# Altium footprint library CustomCase.PcbLib: 411 footprints (part 21 of 26)
Each footprint in its own frame and in the unit in brackets; x right, y up, seen from the top. Pads: shape width x height; smd on the part's side, far side on the other; paste and mask are expansions set on the pad; w line width, h text height; cw(c..) or ccw(c..) is an arc to the next point about the centre after c.
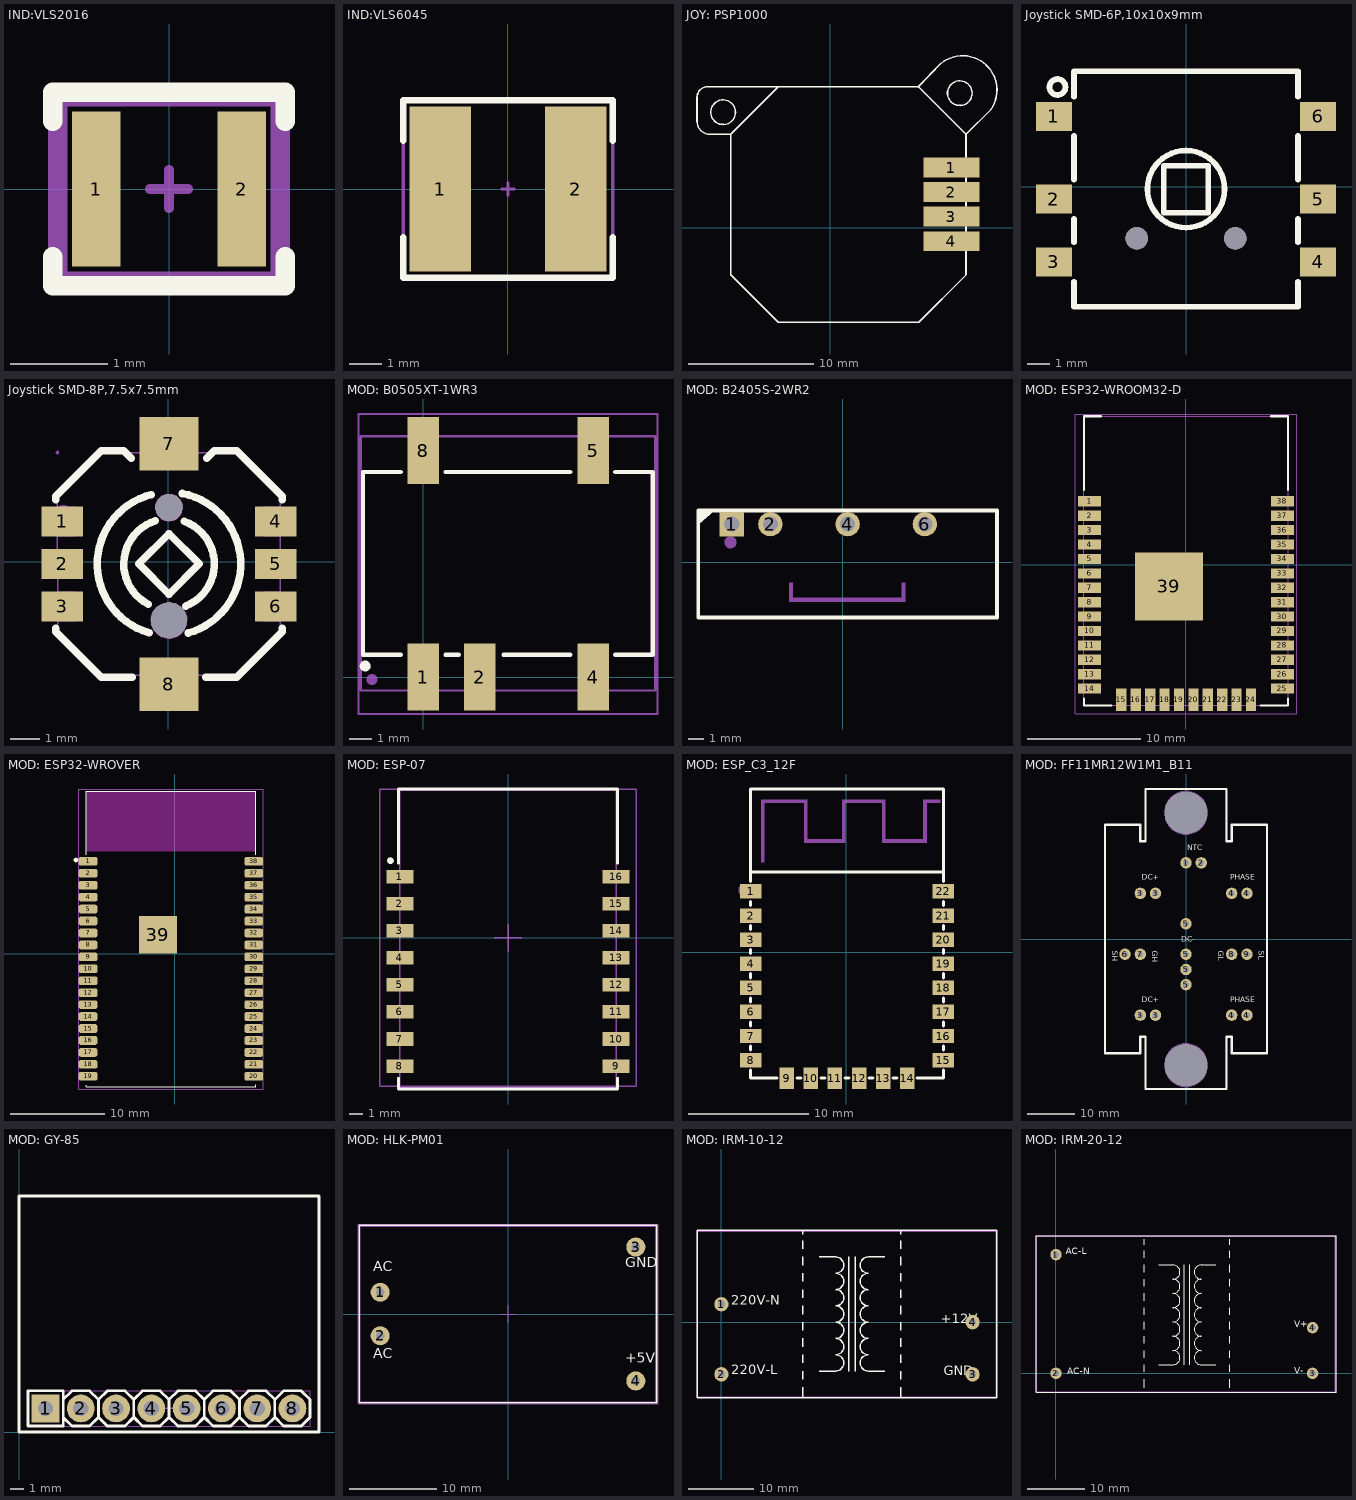
[diagram p20: the footprints below, top view; thin cyan lines are the x and y axes]

## IND:VLS2016 [mm]
pads (2):
  rect 0.5x1.6 smd: 1(-0.75,0) 2(0.75,0)
Top Overlay:
  lines w0.2: -1.2,-0.7 -1.2,-1 1.2,-1 1.2,-0.7 ; -1.2,0.7 -1.2,1 1.2,1 1.2,0.7
Top Assy:
  lines w0.1: -1.1,-0.9 -1.1,0.9 1.1,0.9 1.1,-0.9 -1.1,-0.9
Size Area:
  lines w0.1: -0.2,0 0.2,0 ; 0,-0.2 0,0.2 ; -1.2,-1 -1.2,1 1.2,1 1.2,-1 -1.2,-1
3D body "vls201610hbx-1.step": height 0.99, standoff -0.01, extent -1,-0.8 1,0.8

## IND:VLS6045 [mm]
pads (2):
  rect 1.9x5.1 smd: 1(-2.1,0) 2(2.1,0)
Top Overlay:
  lines w0.2: -3.25,-1.5 -3.25,-2.75 3.25,-2.75 3.25,-1.5 ; -3.25,1.494 -3.25,2.75 3.25,2.75 3.25,1.5
Top Assy:
  lines w0.1: -3.25,2.75 -3.25,-2.75 3.25,-2.75 3.25,2.75 -3.241,2.75
Size Area:
  lines w0.1: -0.2,0 0.2,0 ; 0,-0.2 0,0.2 ; -3.25,-2.75 -3.25,2.75 3.25,2.75 3.25,-2.75 -3.25,-2.75
3D body "vls6045ex.step": height 4.49, standoff -0.01, extent -3,-3 3,3

## JOY: PSP1000 [mm]
pads (4):
  rect 4.5x1.6 smd: 1(9.725,4.825) 2(9.725,2.875) 3(9.725,0.9) 4(9.725,-1.075)
Top Overlay:
  circle w0.127: c10.4,10.8 r0.99
  circle w0.127: c-8.575,9.275 r0.99
  lines w0.127: -4.15,11.325 -7.975,7.5 ; -7.975,7.5 -7.975,7.5 ; -7.975,7.5 -7.975,-3.75 -4.15,-7.575 7.1,-7.575 10.9,-3.775 10.9,7.5 ; -7.975,7.5 -9.625,7.5 cw(c-9.625,8.55) -10.675,8.55 -10.675,10.475 cw(c-9.825,10.475) -9.825,11.325 -9.625,11.325 -4.075,11.325 7.075,11.325 ; 7.075,11.325 8.882,13.178 cw(c10.634,11.058) 12.9,9.5 10.9,7.5 ; 7.075,11.325 7.24,11.16 10.9,7.5
3D body "PSP1000 Joystick v7.sldprt": height 9.74, standoff 0.1, extent -10.625,-7.597 13.289,13.697

## Joystick SMD-6P,10x10x9mm [mm]
pads (8):
  rect 1.6x1.3 smd paste+0 mask+0.05: 1(-5.903,3.15) 2(-5.903,-0.55) 3(-5.903,-3.35) 4(5.897,-3.35) 5(5.897,-0.55) 6(5.897,3.15)
  round 1 hole 1 paste-2539.97 mask+0.102: ""(-2.203,-2.3) ""(2.197,-2.3)
Top Overlay:
  circle w0.254: c-5.743,4.46 r0.355
  circle w0.254: c-0.003,-0.1 r1.721
  lines w0.254: -5.003,-4.231 -5.003,-5.35 4.997,-5.35 4.997,-4.231 ; -5.003,-2.469 -5.003,-1.431 ; -5.003,0.331 -5.003,2.269 ; -5.003,4.031 -5.003,5.15 ; -4.983,5.16 4.997,5.16 4.997,4.031 ; 4.997,-2.469 4.997,-1.431 ; 4.997,0.331 4.997,2.269 ; -0.993,-1.16 0.997,-1.16 0.997,0.95 -0.993,0.95 -0.993,-1.16
Keep-Out Layer:
  board cut-out: -1.728,-2.3 -1.728,-2.394 -1.8,-2.569 -1.934,-2.702 -2.108,-2.775 -2.297,-2.775 -2.472,-2.702 -2.605,-2.569 -2.678,-2.394 -2.678,-2.3 -2.678,-2.205 -2.605,-2.031 -2.472,-1.897 -2.297,-1.825 -2.108,-1.825 -1.934,-1.897 -1.8,-2.031 -1.728,-2.205 -1.728,-2.3
3D body: height 9, standoff 0, extent -1.253,-1.35 1.247,1.15
3D body: height 2.3, standoff 0, extent -5.003,-5.35 4.997,5.16

## Joystick SMD-8P,7.5x7.5mm [mm]
pads (10):
  rect 1.4x1.001 smd: 1(-3.578,1.358) 2(-3.578,-0.072) 3(-3.578,-1.502) 4(3.62,1.358) 5(3.62,-0.072) 6(3.62,-1.502)
  rect 1.999x1.801 smd: 7(0.021,3.977) 8(0.021,-4.123)
  round 1.2 hole 1.2 mask+0.102: ""(0.02,-1.973)
  round 0.9 hole 0.9 mask+0.102: ""(0.02,1.828)
Top Overlay:
  lines w0.254: -3.789,-2.233 -3.789,-2.358 -2.265,-3.882 -1.211,-3.882 ; -3.789,2.09 -3.789,2.214 -2.265,3.738 -1.503,3.738 -1.249,3.484 ; -0.67,-1.428 -0.817,-1.344 -0.954,-1.24 -1.079,-1.123 -1.191,-0.994 -1.287,-0.854 -1.366,-0.702 -1.427,-0.542 -1.47,-0.377 -1.495,-0.209 -1.501,-0.039 -1.488,0.131 -1.455,0.299 -1.404,0.464 -1.335,0.619 -1.249,0.766 -1.147,0.903 -1.031,1.028 -0.901,1.14 -0.759,1.236 -0.609,1.315 -0.449,1.376 ; -0.652,-2.388 -0.858,-2.317 -1.056,-2.231 -1.247,-2.124 -1.427,-2.002 -1.595,-1.865 -1.747,-1.713 -1.889,-1.548 -2.014,-1.37 -2.12,-1.182 -2.212,-0.984 -2.285,-0.781 -2.339,-0.57 -2.374,-0.354 -2.39,-0.138 -2.387,0.078 -2.364,0.294 -2.321,0.507 -2.26,0.715 -2.179,0.916 -2.082,1.112 -1.965,1.295 -1.836,1.467 -1.689,1.627 -1.528,1.775 -1.358,1.907 -1.173,2.024 -0.98,2.123 -0.779,2.204 -0.571,2.265 ; 0.47,2.3 0.679,2.25 0.885,2.181 1.083,2.097 1.271,1.993 1.451,1.874 1.619,1.737 1.774,1.587 1.916,1.424 2.04,1.249 2.152,1.063 2.243,0.868 2.32,0.667 2.375,0.459 2.414,0.246 2.434,0.032 2.431,-0.184 2.414,-0.4 2.373,-0.61 2.317,-0.819 2.241,-1.022 2.147,-1.215 2.038,-1.4 1.911,-1.576 1.768,-1.738 1.613,-1.888 1.443,-2.023 1.263,-2.142 1.075,-2.244 0.877,-2.33 0.671,-2.396 ; 0.542,1.361 0.702,1.292 0.854,1.206 0.996,1.102 1.123,0.98 1.238,0.848 1.337,0.7 1.415,0.545 1.476,0.38 1.52,0.21 1.542,0.035 1.545,-0.141 1.527,-0.316 1.489,-0.486 1.431,-0.654 1.354,-0.811 1.26,-0.958 1.151,-1.096 1.027,-1.22 0.887,-1.327 0.737,-1.418 0.577,-1.492 ; 1.253,-3.882 2.307,-3.882 3.831,-2.358 3.831,-2.233 ; 1.291,3.484 1.545,3.738 2.307,3.738 3.831,2.214 3.831,2.09 ; -0.995,-0.072 0.021,0.944 1.037,-0.072 0.021,-1.088 -0.995,-0.072
Keep-Out Layer:
  lines w0.003: -0.576,-2.025 -0.558,-2.132 -0.52,-2.233 -0.464,-2.325 -0.393,-2.406 -0.309,-2.472 -0.215,-2.523 -0.114,-2.556 -0.007,-2.571 0.102,-2.566 0.206,-2.543 0.305,-2.5 0.394,-2.442 0.473,-2.368 0.537,-2.279 0.582,-2.183 0.61,-2.079 0.62,-1.972 0.61,-1.865 0.582,-1.761 0.537,-1.665 0.473,-1.578 0.394,-1.504 0.305,-1.444 0.206,-1.403 0.102,-1.377 -0.007,-1.372 -0.114,-1.388 -0.215,-1.421 -0.309,-1.471 -0.393,-1.538 -0.464,-1.619 -0.52,-1.713 -0.558,-1.812 -0.576,-1.919 -0.576,-2.025 ; -0.429,1.828 -0.419,1.734 -0.391,1.645 -0.342,1.564 -0.281,1.493 -0.205,1.437 -0.119,1.399 -0.027,1.381 0.067,1.381 0.161,1.399 0.244,1.437 0.321,1.493 0.384,1.564 0.432,1.645 0.46,1.734 0.47,1.828 0.46,1.922 0.432,2.011 0.384,2.092 0.321,2.161 0.244,2.217 0.161,2.255 0.067,2.275 -0.027,2.275 -0.119,2.255 -0.205,2.217 -0.281,2.161 -0.342,2.092 -0.391,2.011 -0.419,1.922 -0.429,1.828
Top Assy:
  lines w0.003: -0.576,-2.025 -0.558,-2.132 -0.52,-2.233 -0.464,-2.325 -0.393,-2.406 -0.309,-2.472 -0.215,-2.523 -0.114,-2.556 -0.007,-2.571 0.102,-2.566 0.206,-2.543 0.305,-2.5 0.394,-2.442 0.473,-2.368 0.537,-2.279 0.582,-2.183 0.61,-2.079 0.62,-1.972 0.61,-1.865 0.582,-1.761 0.537,-1.665 0.473,-1.578 0.394,-1.504 0.305,-1.444 0.206,-1.403 0.102,-1.377 -0.007,-1.372 -0.114,-1.388 -0.215,-1.421 -0.309,-1.471 -0.393,-1.538 -0.464,-1.619 -0.52,-1.713 -0.558,-1.812 -0.576,-1.919 -0.576,-2.025 ; -0.429,1.828 -0.419,1.734 -0.391,1.645 -0.342,1.564 -0.281,1.493 -0.205,1.437 -0.119,1.399 -0.027,1.381 0.067,1.381 0.161,1.399 0.244,1.437 0.321,1.493 0.384,1.564 0.432,1.645 0.46,1.734 0.47,1.828 0.46,1.922 0.432,2.011 0.384,2.092 0.321,2.161 0.244,2.217 0.161,2.255 0.067,2.275 -0.027,2.275 -0.119,2.255 -0.205,2.217 -0.281,2.161 -0.342,2.092 -0.391,2.011 -0.419,1.922 -0.429,1.828
Bottom Assy:
  lines w0.399: -3.728,1.508 -3.718,1.447 -3.69,1.391 -3.647,1.345 -3.591,1.317 -3.53,1.307 -3.467,1.317 -3.411,1.345 -3.367,1.391 -3.34,1.447 -3.329,1.508 -3.34,1.569 -3.367,1.625 -3.411,1.668 -3.467,1.698 -3.53,1.709 -3.591,1.698 -3.647,1.668 -3.69,1.625 -3.718,1.569 -3.728,1.508
Mechanical 6:
  lines w0.051: -3.738,2.257 -2.308,3.677 2.35,3.667 3.77,2.257 3.77,-2.404 2.36,-3.824 -2.318,-3.813 -3.728,-2.404 -3.738,2.257
Mechanical 8:
  region: -3.68,3.677 -3.687,3.644 -3.713,3.624 -3.748,3.619 -3.779,3.631 -3.797,3.662 -3.797,3.695 -3.779,3.723 -3.748,3.738 -3.713,3.733 -3.687,3.71
Top Designator:
  region: -0.728,3.677 0.77,3.677 0.77,3.177 -0.728,3.177
  region: -0.728,-3.323 0.77,-3.323 0.77,-3.824 -0.728,-3.824
  region: 3.171,0.858 3.171,1.858 3.77,1.858 3.77,0.858
  region: 3.171,-0.572 3.171,0.428 3.77,0.428 3.77,-0.572
  region: 3.171,-2.002 3.171,-1.002 3.77,-1.002 3.77,-2.002
  region: -3.738,-2.002 -3.738,-1.002 -3.139,-1.002 -3.139,-2.002
  region: -3.738,-0.572 -3.738,0.428 -3.139,0.428 -3.139,-0.572
  region: -3.738,0.858 -3.738,1.858 -3.139,1.858 -3.139,0.858

## MOD: B0505XT-1WR3 [mm]
pads (7):
  rect 1.4x3 smd: 1(0,0) 2(2.54,0) 4(7.62,0) 5(7.62,10.16) 8(0,10.16)
  round 0.5 on Top Overlay: ""(-2.6,0.5)
  round 0.5 on Mech1: ""(-2.3,-0.1)
Top Overlay:
  lines w0.2: -1,1 -2.7,1 -2.7,9.2 -1,9.2 ; 1,1 1.6,1 ; 1,9.2 6.6,9.2 ; 3.6,1 6.6,1 ; 8.62,1 10.3,1 10.3,9.2 8.62,9.2
Top Assy:
  lines w0.1: -2.8,-0.6 -2.8,10.8 10.4,10.8 10.4,-0.6 -2.8,-0.6
Size Area:
  lines w0.1: -2.897,-1.65 10.5,-1.65 10.5,11.8 0.4,11.8 -2.897,11.8 -2.897,-1.65
3D body "1WR3.STEP": height 7.25, standoff 0, extent -2.8,-0.6 10.4,10.8

## MOD: B2405S-2WR2 [mm]
pads (4):
  rect 1.6x1.6 hole 1: 1(-7.301,2.505)
  round 1.6 hole 1: 2(-4.761,2.505) 4(0.319,2.505) 6(5.399,2.505)
Top Overlay:
  region: -9.587,3.394 -9.46,2.505 -8.444,3.394
  lines w0.254: -9.506,-3.645 -9.506,3.405 10.144,3.405 10.144,-3.645 -9.506,-3.645
Size Area:
  circle w0.4: c-7.381,1.305 r0.2
  region: -3.531,-1.345 -3.531,-2.595 4.119,-2.595 4.119,-1.345 3.869,-1.345 3.869,-2.345 -3.281,-2.345 -3.281,-1.345
3D body: height 10.16, standoff 0, extent -9.506,-3.645 10.144,3.405

## MOD: ESP32-WROOM32-D [mm]
pads (39):
  rect 2x0.9 smd: 1(-8.5,5.6) 2(-8.5,4.33) 3(-8.5,3.06) 4(-8.5,1.79) 5(-8.5,0.52) 6(-8.5,-0.75) 7(-8.5,-2.02) 8(-8.5,-3.29) 9(-8.5,-4.56) 10(-8.5,-5.83) 11(-8.5,-7.1) 12(-8.5,-8.37) 13(-8.5,-9.64) 14(-8.5,-10.91) 25(8.5,-10.91) 26(8.5,-9.64) 27(8.5,-8.37) 28(8.5,-7.1) 29(8.5,-5.83) 30(8.5,-4.56) 31(8.5,-3.29) 32(8.5,-2.02) 33(8.5,-0.75) 34(8.5,0.52) 35(8.5,1.79) 36(8.5,3.06) 37(8.5,4.33) 38(8.5,5.6)
  rect 0.9x2 smd: 15(-5.7,-11.9) 16(-4.43,-11.9) 17(-3.16,-11.9) 18(-1.89,-11.9) 19(-0.62,-11.9) 20(0.65,-11.9) 21(1.92,-11.9) 22(3.19,-11.9) 23(4.46,-11.9) 24(5.73,-11.9)
  rect 6x6 smd: 39(-1.5,-1.9)
Top Overlay:
  lines w0.2: -9,-11.8 -9,-12.4 -6.6,-12.4 ; -9,6.6 -9,7.6 -9,13.1 -7.5,13.1 ; 6.6,-12.4 9,-12.4 9,-11.8 ; 7.5,13.1 9,13.1 9,7.6 9,6.6
Top Assy:
  lines w0.1: -9,-12.4 9,-12.4 ; -9,-12.4 -9,13.1 ; -9,-12.4 9,-12.4 ; -9,-12.4 -9,13.1 ; -9,13.1 9,13.1 ; -9,13.1 9,13.1 ; 9,-12.4 9,13.1 ; 9,-12.4 9,13.1
Size Area:
  lines w0.1: -0.25,0.05 0.25,0.05 ; 0,-0.2 0,0.3 ; -9.75,-13.15 -9.75,13.3 9.75,13.3 9.75,-13.15 -9.75,-13.15
3D body "User Library-ESP321.STEP": height 2.91, standoff -0.01, extent -9,-12.4 9,13.1

## MOD: ESP32-WROVER [mm]
pads (39):
  rrect50% 2x0.93 smd: 1(-9.21,9.802) 2(-9.21,8.532) 3(-9.21,7.262) 4(-9.21,5.992) 5(-9.21,4.722) 6(-9.21,3.452) 7(-9.21,2.182) 8(-9.21,0.912) 9(-9.21,-0.358) 10(-9.21,-1.628) 11(-9.21,-2.898) 12(-9.21,-4.168) 13(-9.21,-5.438) 14(-9.21,-6.708) 15(-9.21,-7.978) 16(-9.21,-9.248) 17(-9.21,-10.518) 18(-9.21,-11.788) 19(-9.21,-13.058) 20(8.41,-13.058) 21(8.41,-11.788) 22(8.41,-10.518) 23(8.41,-9.248) 24(8.41,-7.978) 25(8.41,-6.708) 26(8.41,-5.438) 27(8.41,-4.168) 28(8.41,-2.898) 29(8.41,-1.628) 30(8.41,-0.358) 31(8.41,0.912) 32(8.41,2.182) 33(8.41,3.452) 34(8.41,4.722) 35(8.41,5.992) 36(8.41,7.262) 37(8.41,8.532) 38(8.41,9.802)
  rect 4x4 smd paste-3: 39(-1.78,2.012)
Top Overlay:
  circle w0.24: c-10.5,9.942 r0.12
  lines w0.127: -9.4,-14.008 -9.4,-14.158 8.6,-14.158 8.6,-13.958 ; -9.4,10.492 -9.4,17.242 8.6,17.242 8.6,10.492
Top Paste:
  region: -0.515,0.746 -3.048,0.746 -3.048,3.277 -0.515,3.277
Keep-Out Layer:
  region: 8.6,10.872 -9.429,10.872 -9.429,17.242 8.6,17.242
  region: 8.6,10.873 -9.43,10.873 -9.43,17.242 8.6,17.242
Size Area:
  lines w0.05: -10.2,-14.408 9.4,-14.408 9.4,17.492 -10.2,17.492 -10.2,-14.408
3D body "ESP32_Wrover.step": height 3.3, standoff 0, extent -9.4,-14.158 8.6,17.242

## MOD: ESP-07 [mm]
pads (17):
  rect 2x1 smd: 1(-8,4.5) 2(-8,2.5) 3(-8,0.5) 4(-8,-1.5) 5(-8,-3.5) 6(-8,-5.5) 7(-8,-7.5) 8(-8,-9.5) 9(8,-9.5) 10(8,-7.5) 11(8,-5.5) 12(8,-3.5) 13(8,-1.5) 14(8,0.5) 15(8,2.5) 16(8,4.5)
  round 0.5 on Top Overlay: ""(-8.7,5.7)
Top Overlay:
  lines w0.2: -8.1,-10.4 -8.1,-11.2 8.1,-11.2 8.1,-10.4 ; -8.1,5.5 -8.1,10.9 -8.1,11 8.1,11 8.1,5.5
Top Assy:
  lines w0.1: -8,-11.1 8,-11.1 8,10.9 -8,10.9 -8,-11.1
Size Area:
  lines w0.1: -1,0 1,0 ; 0,-1 0,1 ; -9.5,-11 -9.5,11 9.5,11 9.5,-11 -9.5,-11
3D body "User Library-ESP07-1.STEP": height 3.5, standoff -0.01, extent -8,-11.1 8,10.9

## MOD: ESP_C3_12F [mm]
pads (22):
  rect 1.8x1.2 smd: 1(-7.927,5.046) 2(-7.927,3.046) 3(-7.927,1.046) 4(-7.927,-0.954) 5(-7.927,-2.954) 6(-7.927,-4.954) 7(-7.927,-6.954) 8(-7.927,-8.954) 15(8.073,-8.954) 16(8.073,-6.954) 17(8.073,-4.954) 18(8.073,-2.954) 19(8.073,-0.954) 20(8.073,1.046) 21(8.073,3.046) 22(8.073,5.046)
  rect 1.2x1.8 smd: 9(-4.927,-10.454) 10(-2.927,-10.454) 11(-0.927,-10.454) 12(1.073,-10.454) 13(3.073,-10.454) 14(5.073,-10.454)
Top Overlay:
  lines w0.254: -7.927,-9.785 -7.927,-10.451 -5.758,-10.451 ; -7.927,-8.123 -7.927,-7.785 ; -7.927,-6.123 -7.927,-5.785 ; -7.927,-4.123 -7.927,-3.785 ; -7.927,-2.123 -7.927,-1.785 ; -7.927,-0.123 -7.927,0.215 ; -7.927,1.877 -7.927,2.215 ; -7.927,3.877 -7.927,4.215 ; -7.927,5.877 -7.927,13.546 0.073,13.546 8.074,13.546 ; -7.927,6.665 8.074,6.665 ; -4.096,-10.451 -3.758,-10.451 ; -2.096,-10.451 -1.758,-10.451 ; -0.096,-10.451 0.242,-10.451 ; 1.904,-10.451 2.242,-10.451 ; 3.904,-10.451 4.242,-10.451 ; 5.904,-10.451 8.074,-10.451 8.074,-9.785 ; 8.074,-8.123 8.074,-7.785 ; 8.074,-6.123 8.074,-5.785 ; 8.074,-4.123 8.074,-3.785 ; 8.074,-2.123 8.074,-1.785 ; 8.074,-0.123 8.074,0.215 ; 8.074,1.877 8.074,2.215 ; 8.074,3.877 8.074,4.215 ; 8.074,5.877 8.074,13.552
Size Area:
  circle w0.5: c-8.452,5.164 r0.25
  region: -7.039,7.456 -7.039,12.663 -6.785,12.663 -6.785,7.456
  region: -6.785,12.663 -3.483,12.663 -3.483,12.409 -6.785,12.409
  region: -3.483,12.663 -3.483,9.107 -3.229,9.107 -3.229,12.663
  region: -3.229,9.107 -0.308,9.107 -0.308,9.361 -3.229,9.361
  region: -0.308,9.107 -0.308,12.663 -0.054,12.663 -0.054,9.107
  region: -0.054,12.663 2.994,12.663 2.994,12.409 -0.054,12.409
  region: 2.994,12.663 2.994,9.107 3.248,9.107 3.248,12.663
  region: 3.248,9.107 6.423,9.107 6.423,9.361 3.248,9.361
  region: 6.423,9.107 6.423,12.663 6.677,12.663 6.677,9.107
  region: 6.677,12.663 7.82,12.663 7.82,12.409 6.677,12.409
3D body "ESP-C3-12F.step": height 3.2, standoff 0, extent -7.948,-10.451 8.052,13.549

## MOD: FF11MR12W1M1_B11 [mm]
pads (20):
  round 2.4 hole 1.2: 1(0,16) 2(3.2,16) 3(-9.6,-16) 3(-9.6,9.6) 3(-6.4,-16) 3(-6.4,9.6) 4(9.6,-16) 4(9.6,9.6) 4(12.8,-16) 4(12.8,9.6) 5(0,-9.6) 5(0,-6.4) 5(0,-3.2) 5(0,3.2) 6(-12.8,-3.2) 7(-9.6,-3.2) 8(9.6,-3.2) 9(12.8,-3.2)
  round 0 hole 9: MH(0,-26.5) MH(0,26.5)
Top Overlay:
  lines w0.5: -17,-24 -9.6,-24 -9.6,-20.5 -8.5,-20.5 -8.5,-31.5 0,-31.5 8.5,-31.5 8.5,-20.5 9.6,-20.5 9.6,-24 17,-24 17,24 9.6,24 9.6,20.5 8.5,20.5 8.5,31.5 0,31.5 -8.5,31.5 -8.5,20.5 -9.6,20.5 -9.6,24 -17,24 -17,-24
  text "GL" at 6.4,-2.5 h2
  text "SL" at 14.9,-2.5 h2
  text "SH" at -15.9,-2.5 h2
  text "GH" at -7.5,-2.5 h2
  text "DC-" at -1,-1 h2
  text "DC+" at -9.25,-13.75 h2
  text "DC+" at -9.25,12 h2
  text "NTC" at 0.25,18.25 h2
  text "PHASE" at 9.25,-13.75 h2
  text "PHASE" at 9.25,12 h2
Top Assy:
  circle w0.1: c0,-26.5 r4.5
  circle w0.1: c0,26.5 r4.5
  lines w0.1: -17,-24 -9.6,-24 -9.6,-20.5 -8.5,-20.5 -8.5,-31.5 0,-31.5 8.5,-31.5 8.5,-20.5 9.6,-20.5 9.6,-24 17,-24 17,24 9.6,24 9.6,20.5 8.5,20.5 8.5,31.5 0,31.5 -8.5,31.5 -8.5,20.5 -9.6,20.5 -9.6,24 -17,24 -17,-24
3D body "FF11MR12W1M1_B11.step": height 1.4, standoff -15, extent -16.9,-31.4 16.9,31.4

## MOD: GY-85 [mm]
pads (8):
  rect 2x2 hole 1.1: 1(1.91,1.7)
  round 2 hole 1.1: 2(4.45,1.7) 3(6.99,1.7) 4(9.53,1.7) 5(12.07,1.7) 6(14.61,1.7) 7(17.15,1.7) 8(19.69,1.7)
Top Overlay:
  lines w0.2: 3.18,1.065 3.815,0.43 5.085,0.43 5.72,1.065 ; 3.18,2.335 3.815,2.97 5.085,2.97 5.72,2.335 ; 5.72,1.065 6.355,0.43 7.625,0.43 8.26,1.065 ; 5.72,1.065 5.72,2.335 ; 5.72,2.335 6.355,2.97 7.625,2.97 8.26,2.335 ; 8.26,1.065 8.895,0.43 10.165,0.43 10.8,1.065 ; 8.26,1.065 8.26,2.335 ; 8.26,2.335 8.895,2.97 10.165,2.97 10.8,2.335 ; 10.8,1.065 11.435,0.43 12.705,0.43 13.34,1.065 ; 10.8,1.065 10.8,2.335 ; 10.8,2.335 11.435,2.97 12.705,2.97 13.34,2.335 ; 13.34,1.065 13.34,2.335 ; 13.34,1.065 13.975,0.43 15.245,0.43 15.88,1.065 ; 13.34,2.335 13.975,2.97 15.245,2.97 15.88,2.335 ; 15.88,1.065 16.515,0.43 17.785,0.43 18.42,1.065 ; 15.88,1.065 15.88,2.335 ; 15.88,2.335 16.515,2.97 17.785,2.97 18.42,2.335 ; 18.42,1.065 18.42,2.335 ; 18.42,1.065 19.055,0.43 20.325,0.43 20.96,1.065 20.96,2.335 20.325,2.97 19.055,2.97 18.42,2.335 ; 0,0 21.6,0 21.6,17 0,17 0,0 ; 0.64,0.43 3.18,0.43 3.18,2.97 0.64,2.97 0.64,0.43
Top Assy:
  lines w0.1: 3.18,1.065 3.815,0.43 5.085,0.43 5.72,1.065 ; 3.18,2.335 3.815,2.97 5.085,2.97 5.72,2.335 ; 5.72,1.065 5.72,2.335 ; 5.72,1.065 6.355,0.43 7.625,0.43 8.26,1.065 ; 5.72,2.335 6.355,2.97 7.625,2.97 8.26,2.335 ; 8.26,1.065 8.26,2.335 ; 8.26,1.065 8.895,0.43 10.165,0.43 10.8,1.065 ; 8.26,2.335 8.895,2.97 10.165,2.97 10.8,2.335 ; 10.8,1.065 10.8,2.335 ; 10.8,1.065 11.435,0.43 12.705,0.43 13.34,1.065 ; 10.8,2.335 11.435,2.97 12.705,2.97 13.34,2.335 ; 13.34,1.065 13.975,0.43 15.245,0.43 15.88,1.065 ; 13.34,1.065 13.34,2.335 ; 13.34,2.335 13.975,2.97 15.245,2.97 15.88,2.335 ; 15.88,1.065 15.88,2.335 ; 15.88,1.065 16.515,0.43 17.785,0.43 18.42,1.065 ; 15.88,2.335 16.515,2.97 17.785,2.97 18.42,2.335 ; 18.42,1.065 19.055,0.43 20.325,0.43 20.96,1.065 20.96,2.335 20.325,2.97 19.055,2.97 18.42,2.335 ; 18.42,1.065 18.42,2.335 ; 0.64,0.43 0.64,2.97 3.18,2.97 3.18,0.43 0.64,0.43
Size Area:
  lines w0.05: 0,0 21.6,0 21.6,17 0,17 0,0 ; 0.64,0.43 0.64,2.97 20.96,2.97 20.96,0.43 0.64,0.43
  lines w0.1: 10.3,1.7 11.3,1.7 ; 10.8,1.2 10.8,2.2
3D body "PLS-8.STEP": height 8.54, standoff -3, extent 0.64,0.43 20.96,2.97

## MOD: HLK-PM01 [mm]
height 15
pads (4):
  round 2.2 hole 1: 1(-14.7,2.5) 2(-14.7,-2.5) 3(14.7,7.7) 4(14.7,-7.7)
Top Overlay:
  lines w0.2: -17.1,-10.2 -17.1,10.2 17.1,10.2 17.1,-10.2 -0.2,-10.2 -17.1,-10.2
  text "GND" at 13.5,5 h2
  text "+5V" at 13.5,-6 h2
  text "AC" at -15.5,-5.5 h2
  text "AC" at -15.5,4.5 h2
Top Assy:
  lines w0.1: -17,-10.1 -17,10.1 17,10.1 17,-10.1 -17,-10.1
Size Area:
  lines w0.1: -1,0 1,0 ; 0,-1 0,1 ; -17.25,-10.35 17.25,-10.35 17.25,10.35 -17.25,10.35 -17.25,-10.35
3D body "HLK-PM01.STEP": height 15.07, standoff -4.95, extent -17,-10.1 17,10.1

## MOD: IRM-10-12 [mm]
pads (4):
  round 2.2 hole 1.1: 1(0,2.75) 2(0,-8) 3(38.5,-8) 4(38.5,0)
Top Overlay:
  lines w0.2: 12.5,-11.5 12.5,-10 ; 12.5,-8.75 12.5,-7.5 ; 12.5,-6.25 12.5,-5 ; 12.5,-3.75 12.5,-2.5 ; 12.5,-1.25 12.5,0 ; 12.5,1.25 12.5,2.5 ; 12.5,3.75 12.5,5 ; 12.5,6.25 12.5,7.5 ; 12.5,8.75 12.5,10 ; 12.5,11.25 12.5,12.5 ; 12.5,13.5 12.5,14 ; 15,-7.5 17.5,-7.5 ccw(c17.5,-6.25) 17.5,-5 ccw(c17.5,-3.75) 17.5,-2.5 ccw(c17.5,-1.25) 17.5,0 ccw(c17.5,1.25) 17.5,2.5 ccw(c17.5,3.75) 17.5,5 ccw(c17.5,6.25) 17.5,7.5 ccw(c17.5,8.75) 17.5,10 15,10 ; 19.5,-7.5 19.5,10 ; 20.5,-7.5 20.5,10 ; 25,-7.5 22.5,-7.5 cw(c22.5,-6.25) 22.5,-5 cw(c22.5,-3.75) 22.5,-2.5 cw(c22.5,-1.25) 22.5,0 cw(c22.5,1.25) 22.5,2.5 cw(c22.5,3.75) 22.5,5 cw(c22.5,6.25) 22.5,7.5 cw(c22.5,8.75) 22.5,10 25,10 ; 27.5,-11.5 27.5,-10 ; 27.5,-8.75 27.5,-7.5 ; 27.5,-6.25 27.5,-5 ; 27.5,-3.75 27.5,-2.5 ; 27.5,-1.25 27.5,0 ; 27.5,1.25 27.5,2.5 ; 27.5,3.75 27.5,5 ; 27.5,6.25 27.5,7.5 ; 27.5,8.75 27.5,10 ; 27.5,11.25 27.5,12.5 ; 27.5,13.5 27.5,14 ; -3.75,-11.6 42.25,-11.6 42.25,14.1 -3.75,14.1 -3.75,-11.6
  text "220V-N" at 1.5,2.1 h2.5
  text "220V-L" at 1.5,-8.5 h2.5
  text "+12V" at 33.6,-0.7 h2.5
  text "GND" at 34.1,-8.7 h2.5
Top Assy:
  lines w0.1: -3.6,-11.45 -3.6,13.95 42.099,13.95 42.099,-11.45 -3.6,-11.45
Size Area:
  lines w0.1: -3.7,-11.55 42.2,-11.55 42.2,14.05 -3.7,14.05 -3.7,-11.55
3D body "User Library-IRM-10-12.STEP": height 22.05, standoff -3.5, extent -3.6,-11.45 42.099,13.95

## MOD: IRM-20-12 [mm]
pads (4):
  round 2 hole 1.1: 1(0,20.8) 2(0,0) 3(45,0) 4(45,8)
Top Overlay:
  lines w0.2: 15.5,-2.5 15.5,-1 ; 15.5,0.25 15.5,1.5 ; 15.5,2.75 15.5,4 ; 15.5,5.25 15.5,6.5 ; 15.5,7.75 15.5,9 ; 15.5,10.25 15.5,11.5 ; 15.5,12.75 15.5,14 ; 15.5,15.25 15.5,16.5 ; 15.5,17.75 15.5,19 ; 15.5,20.25 15.5,21.5 ; 15.5,22.5 15.5,23.5 ; 18,1.5 20.5,1.5 ccw(c20.5,2.75) 20.5,4 ccw(c20.5,5.25) 20.5,6.5 ccw(c20.5,7.75) 20.5,9 ccw(c20.5,10.25) 20.5,11.5 ccw(c20.5,12.75) 20.5,14 ccw(c20.5,15.25) 20.5,16.5 ccw(c20.5,17.75) 20.5,19 18,19 ; 22.5,1.5 22.5,19 ; 23.5,1.5 23.5,19 ; 28,1.5 25.5,1.5 cw(c25.5,2.75) 25.5,4 cw(c25.5,5.25) 25.5,6.5 cw(c25.5,7.75) 25.5,9 cw(c25.5,10.25) 25.5,11.5 cw(c25.5,12.75) 25.5,14 cw(c25.5,15.25) 25.5,16.5 cw(c25.5,17.75) 25.5,19 28,19 ; 30.5,-2.5 30.5,-1 ; 30.5,0.25 30.5,1.5 ; 30.5,2.75 30.5,4 ; 30.5,5.25 30.5,6.5 ; 30.5,7.75 30.5,9 ; 30.5,10.25 30.5,11.5 ; 30.5,12.75 30.5,14 ; 30.5,15.25 30.5,16.5 ; 30.5,17.75 30.5,19 ; 30.5,20.25 30.5,21.5 ; 30.5,22.5 30.5,23.5 ; -3.5,-3.3 -3.5,24.1 49.1,24.1 49.1,-3.3 -3.5,-3.3
  text "AC-L" at 1.7,20.4 h2
  text "AC-N" at 2,-0.6 h2
  text "V-" at 41.8,-0.5 h2
  text "V+" at 41.8,7.6 h2
Top Assy:
  lines w0.1: -3.4,-3.2 -3.4,24 49,24 49,-3.2 -3.4,-3.2
  text "AC-L" at 1.7,20.4 h2
  text "AC-N" at 2,-0.6 h2
  text "V-" at 41.8,-0.5 h2
  text "V+" at 41.8,7.6 h2
Size Area:
  lines w0.1: -3.5,-3.3 49.1,-3.3 49.1,24.1 -3.5,24.1 -3.5,-3.3
3D body "IRM-20-12.STEP": height 24, standoff -3, extent -3.4,-3.2 49,24